# Altium integrated library MCP2562FDT-H_SN.IntLib: 1 symbol
Pins are listed as number, name and electrical type; pins without a type are passive.

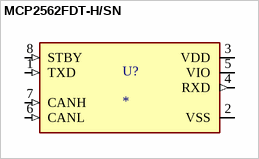
[diagram p0: symbol MCP2562FDT-H/SN]

## MCP2562FDT-H/SN
designator U?
CAN Flexible Data Rate Transceiver | Microchip Technology Inc. MCP2562FDT-H/SN; SnapEDA_Link: https://www.snapeda.com/parts/MCP2562FDT-H/SN/Microchip/view-part/?ref=snap; Package: SO-8 Microchip; Value: *; MF: Microchip; MP: MCP2562FDT-H/SN; Check_prices: https://www.snapeda.com/parts/MCP2562FDT-H/SN/Microchip/view-part/?ref=eda
footprint SOIC127P600X175-8N
pins: 1 TXD (in), 2 VSS (power), 3 VDD (power), 4 RXD (out), 5 VIO (power), 6 CANL (in), 7 CANH (in), 8 STBY (in)